# Altium schematic symbol library Ic%.SchLib: 452 symbols (part 3 of 12)
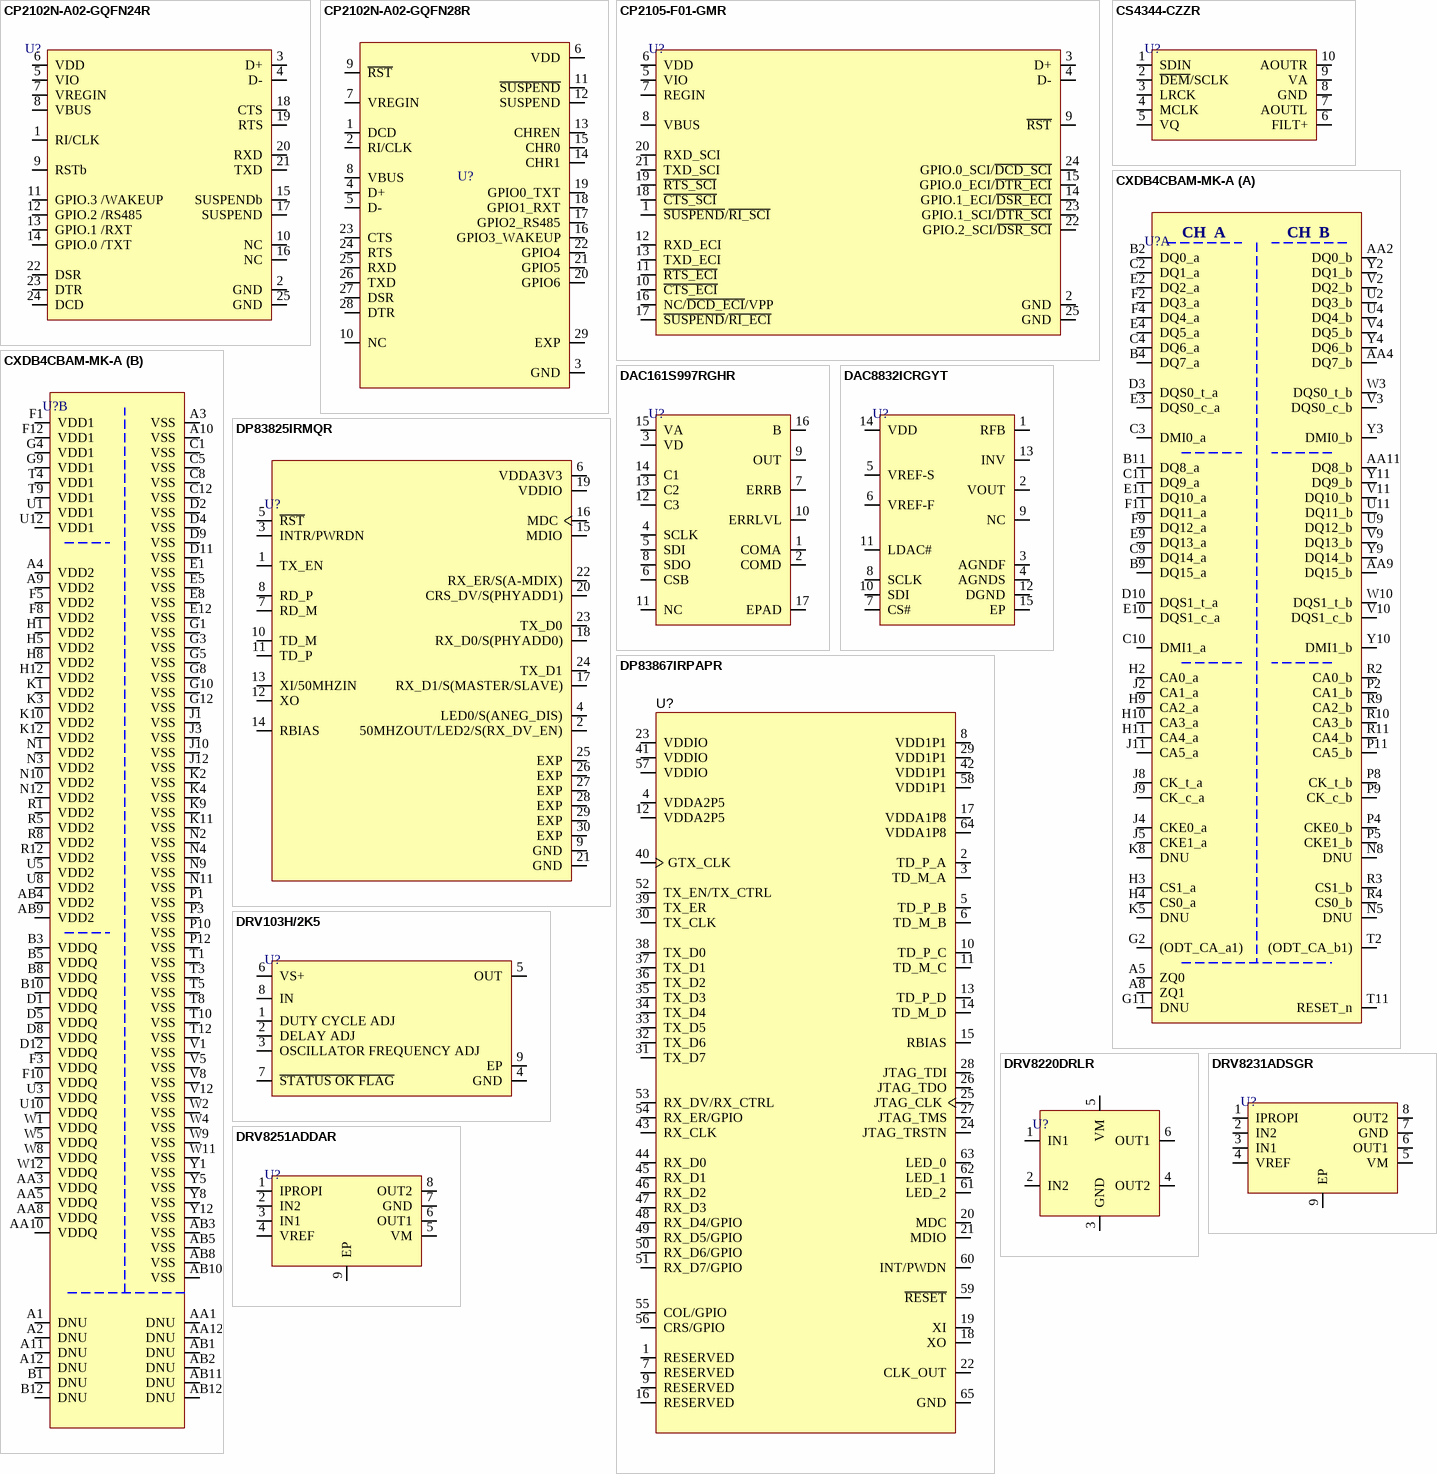
[diagram p25: symbols CP2102N-A02-GQFN24R to DRV8251ADDAR]

## CP2102N-A02-GQFN28R
designator U?
Full Speed USB to UART Bridge USB 2.0 3.3V T/R Automotive 28-Pin QFN EP; Manufacturer: Silicon Labs; Manufacturer Part Number: CP2102N-A02-GQFN28R; Operating Supply Current: 9.5mA; Item Type: IC; Supplier: Arrow Electronics; Supplier Part Number: CP2102N-A02-GQFN28R; RoHS: Yes; Category: USB Interface ICs; Stock: 16500; Pricing: 1500=2.369, 3000=2.265 (USD); Case/Package: QFN; Min Operating Temperature: -40°C; Max Operating Temperature: 85°C; Interface: UART; Series: USBXpress™; Packaging: Cut Tape; ComponentLink1URL: https://www.silabs.com/documents/public/data-sheets/cp2102n-datasheet.pdf?src-supplier=Digikey; ComponentLink1Description: https://www.silabs.com/documents/public/data-sheets/cp2102n-datasheet.pdf?src-supplier=Digikey; ComponentLink2URL: https://4donline.ihs.com/images/VipMasterIC/IC/SILC/SILC-S-A0007770867/SILC-S-A0007770867-1.pdf?hkey=6D3A4C79FDBF58556ACFDE234799DDF0&src-supplier=Farnell; ComponentLink2Description: https://4donline.ihs.com/images/VipMasterIC/IC/SILC/SILC-S-A0007770867/SILC-S-A0007770867-1.pdf?hkey=6D3A4C79FDBF58556ACFDE234799DDF0&src-supplier=Farnell; LCSC Part Number: C964632
footprint 28-QFN (5x5)_
pins: 1 DCD, 2 RI/CLK, 3 GND, 4 D+, 5 D-, 6 VDD, 7 VREGIN, 8 VBUS, 9 ~{RST}, 10 NC, 11 ~{SUSPEND}, 12 SUSPEND, 13 CHREN, 14 CHR1, 15 CHR0, 16 GPIO3_WAKEUP, 17 GPIO2_RS485, 18 GPIO1_RXT, 19 GPIO0_TXT, 20 GPIO6, 21 GPIO5, 22 GPIO4, 23 CTS, 24 RTS, 25 RXD, 26 TXD, 27 DSR, 28 DTR, 29 EXP

## CP2105-F01-GMR
designator U?
IC SGL USB-DL UART BRIDGE 24QFN; Manufacturer: Silicon Labs; Manufacturer Part Number: CP2105-F01-GMR; Number of Channels: 1; Max Supply Voltage: 3.6V; Min Supply Voltage: 3V; Number of I/Os: 5; Operating Supply Current: 17mA; Data Rate: 2Mbps; ESD Protection: Yes; Supplier: Digikey; Supplier Part Number: CP2105-F01-GMRCT-ND; RoHS: Yes; Item Type: IC; Stock: 15350; Pricing: 1=5.17, 10=4.639, 25=4.386, 100=3.8011, 250=3.6062, 500=3.23584 (USD); Mounting Technology: Surface Mount; Case/Package: QFN; Pins: 24; Weight: 0.001764oz; Min Operating Temperature: -40°C; Max Operating Temperature: 85°C; Packaging: Tape and Reel; Package Quantity: 1500; Interface: UART; Number of Transceivers: 1; Series: -; Length: 4mm; Width: 4mm; Height: 0.75mm; ComponentLink1URL: https://datasheet.ciiva.com/12097/cp2105-25736-12097507.pdf?src-supplier=Mouser; ComponentLink1Description: https://datasheet.ciiva.com/12097/cp2105-25736-12097507.pdf?src-supplier=Mouser
footprint 24-WQFN (4x4)
pins: 1 ~{SUSPEND}/~{RI_SCI}, 2 GND, 3 D+, 4 D-, 5 VIO, 6 VDD, 7 REGIN, 8 VBUS, 9 ~{RST}, 10 ~{CTS_ECI}, 11 ~{RTS_ECI}, 12 RXD_ECI, 13 TXD_ECI, 14 GPIO.1_ECI/~{DSR_ECI}, 15 GPIO.0_ECI/~{DTR_ECI}, 16 NC/~{DCD_ECI}/VPP, 17 ~{SUSPEND}/~{RI_ECI}, 18 ~{CTS_SCI}, 19 ~{RTS_SCI}, 20 RXD_SCI, 21 TXD_SCI, 22 GPIO.2_SCI/~{DSR_SCI}, 23 GPIO.1_SCI/~{DTR_SCI}, 24 GPIO.0_SCI/~{DCD_SCI}, 25 GND

## CS4344-CZZR
designator U?
MSOP-10 Digital To Analog Converters (DACs) ROHS; Manufacturer: Cirrus Logic; Manufacturer Part Number: CS4344-CZZR; Item Type: IC; Package: MSOP-10; LCSC Part Number: C8952; ComponentLink1Description: LCSC; ComponentLink1URL: https://www.lcsc.com/product-detail/Digital-To-Analog-Converters-DACs_Cirrus-Logic-CS4344-CZZR_C8952.html
footprint 10-MSOP
pins: 1 SDIN, 2 ~{DE}~{M}/SCLK, 3 LRCK, 4 MCLK, 5 VQ, 6 FILT+, 7 AOUTL, 8 GND, 9 VA, 10 AOUTR

## CXDB4CBAM-MK-A
designator U?
FBGA-200 DDR SDRAM; Manufacturer: CXMT; Manufacturer Part Number: CXDB4CBAM-MK-A; Item Type: IC; Package: FBGA-200; LCSC Part Number: C20598565; ComponentLink1Description: LCSC; ComponentLink1URL: https://www.lcsc.com/product-detail/DDR-SDRAM_CXMT-CXDB4CBAM-MK-A_C20598565.html
footprint 200-WFBGA (10x15)
part A pins: A5 ZQ0, A8 ZQ1, AA2 DQ0_b, AA4 DQ7_b, AA9 DQ15_b, AA11 DQ8_b, B2 DQ0_a, B4 DQ7_a, B9 DQ15_a, B11 DQ8_a, C2 DQ1_a, C3 DMI0_a, C4 DQ6_a, C9 DQ14_a, C10 DMI1_a, C11 DQ9_a, D3 DQS0_t_a, D10 DQS1_t_a, E2 DQ2_a, E3 DQS0_c_a, E4 DQ5_a, E9 DQ13_a, E10 DQS1_c_a, E11 DQ10_a, F2 DQ3_a, F4 DQ4_a, F9 DQ12_a, F11 DQ11_a, G2 (ODT_CA_a1), G11 DNU, H2 CA0_a, H3 CS1_a, H4 CS0_a, H9 CA2_a, H10 CA3_a, H11 CA4_a, J2 CA1_a, J4 CKE0_a, J5 CKE1_a, J8 CK_t_a, J9 CK_c_a, J11 CA5_a, K5 DNU, K8 DNU, N5 DNU, N8 DNU, P2 CA1_b, P4 CKE0_b, P5 CKE1_b, P8 CK_t_b, P9 CK_c_b, P11 CA5_b, R2 CA0_b, R3 CS1_b, R4 CS0_b, R9 CA2_b, R10 CA3_b, R11 CA4_b, T2 (ODT_CA_b1), T11 RESET_n, U2 DQ3_b, U4 DQ4_b, U9 DQ12_b, U11 DQ11_b, V2 DQ2_b, V3 DQS0_c_b, V4 DQ5_b, V9 DQ13_b, V10 DQS1_c_b, V11 DQ10_b, W3 DQS0_t_b, W10 DQS1_t_b, Y2 DQ1_b, Y3 DMI0_b, Y4 DQ6_b, Y9 DQ14_b, Y10 DMI1_b, Y11 DQ9_b
part B pins: A1 DNU, A2 DNU, A3 VSS, A4 VDD2, A9 VDD2, A10 VSS, A11 DNU, A12 DNU, AA1 DNU, AA3 VDDQ, AA5 VDDQ, AA8 VDDQ, AA10 VDDQ, AA12 DNU, AB1 DNU, AB2 DNU, AB3 VSS, AB4 VDD2, AB5 VSS, AB8 VSS, AB9 VDD2, AB10 VSS, AB11 DNU, AB12 DNU, B1 DNU, B3 VDDQ, B5 VDDQ, B8 VDDQ, B10 VDDQ, B12 DNU, C1 VSS, C5 VSS, C8 VSS, C12 VSS, D1 VDDQ, D2 VSS, D4 VSS, D5 VDDQ, D8 VDDQ, D9 VSS, D11 VSS, D12 VDDQ, E1 VSS, E5 VSS, E8 VSS, E12 VSS, F1 VDD1, F3 VDDQ, F5 VDD2, F8 VDD2, F10 VDDQ, F12 VDD1, G1 VSS, G3 VSS, G4 VDD1, G5 VSS, G8 VSS, G9 VDD1, G10 VSS, G12 VSS, H1 VDD2, H5 VDD2, H8 VDD2, H12 VDD2, J1 VSS, J3 VSS, J10 VSS, J12 VSS, K1 VDD2, K2 VSS, K3 VDD2, K4 VSS, K9 VSS, K10 VDD2, K11 VSS, K12 VDD2, N1 VDD2, N2 VSS, N3 VDD2, N4 VSS, N9 VSS, N10 VDD2, N11 VSS, N12 VDD2, P1 VSS, P3 VSS, P10 VSS, P12 VSS, R1 VDD2, R5 VDD2, R8 VDD2, R12 VDD2, T1 VSS, T3 VSS, T4 VDD1, T5 VSS, T8 VSS, T9 VDD1, T10 VSS, T12 VSS, U1 VDD1, U3 VDDQ, U5 VDD2, U8 VDD2, U10 VDDQ, U12 VDD1, V1 VSS, V5 VSS, V8 VSS, V12 VSS, W1 VDDQ, W2 VSS, W4 VSS, W5 VDDQ, W8 VDDQ, W9 VSS, W11 VSS, W12 VDDQ, Y1 VSS, Y5 VSS, Y8 VSS, Y12 VSS
part A text: CH  A; CH  B

## DAC161S997RGHR
designator U?
IC DAC 16BIT 16WQFN; Manufacturer: Texas Instruments; Manufacturer Part Number: DAC161S997RGHR; Supplier: Mouser; LCSC Part Number: C90500; RoHS: Yes; Item Type: IC; Stock: 4693; Pricing: 1=5.54, 10=4.08, 50=4.08, 100=3.71, 1000=3.03, 10000=2.74 (USD); ComponentLink1URL: https://datasheet.ciiva.com/18633/dac161s997-18633093.pdf?src-supplier=Digikey; ComponentLink1Description: https://datasheet.ciiva.com/18633/dac161s997-18633093.pdf?src-supplier=Digikey; ComponentLink2URL: https://datasheet.ciiva.com/29897/dac161s997-29897307.pdf?src-supplier=Avnet; ComponentLink2Description: https://datasheet.ciiva.com/29897/dac161s997-29897307.pdf?src-supplier=Avnet
footprint 16-WQFN (4x4)
pins: 1 COMA, 2 COMD, 3 VD, 4 SCLK, 5 SDI, 6 CSB, 7 ERRB, 8 SDO, 9 OUT, 10 ERRLVL, 11 NC, 12 C3, 13 C2, 14 C1, 15 VA, 16 B, 17 EPAD

## DAC8832ICRGYT
designator U?
IC DAC 16BIT V-OUT 14VQFN; Manufacturer: Texas Instruments; Manufacturer Part Number: DAC8832ICRGYT; Supplier: Mouser; LCSC Part Number: C2876764; RoHS: Yes; Item Type: IC; Stock: 307; Pricing: 1=16.19, 10=12.83, 50=11.99, 100=11.06, 1000=10.23, 10000=10.23 (USD); ComponentLink1URL: https://datasheet.ciiva.com/12285/sbas380b-190797-12285552.pdf?src-supplier=Mouser; ComponentLink1Description: https://datasheet.ciiva.com/12285/sbas380b-190797-12285552.pdf?src-supplier=Mouser; ComponentLink2URL: https://datasheet.ciiva.com/15147/getdatasheetpartid-247745-15147072.pdf?src-supplier=Verical; ComponentLink2Description: https://datasheet.ciiva.com/15147/getdatasheetpartid-247745-15147072.pdf?src-supplier=Verical; ComponentLink3URL: https://datasheet.ciiva.com/41460/001186155-da-01-en-ic-dac-16bit-vo-dac8832icrgyt-qfn-14-tid-41460090.pdf?src-supplier=Conrad; ComponentLink3Description: https://datasheet.ciiva.com/41460/001186155-da-01-en-ic-dac-16bit-vo-dac8832icrgyt-qfn-14-tid-41460090.pdf?src-supplier=Conrad; ComponentLink4URL: https://datasheet.ciiva.com/14254/sbas380b-14254541.pdf?src-supplier=Avnet; ComponentLink4Description: https://datasheet.ciiva.com/14254/sbas380b-14254541.pdf?src-supplier=Avnet; ComponentLink5URL: https://datasheet.ciiva.com/1364/dac8832-1364376.pdf?src-supplier=Digikey; ComponentLink5Description: https://datasheet.ciiva.com/1364/dac8832-1364376.pdf?src-supplier=Digikey; ComponentLink6URL: https://datasheet.ciiva.com/1364/dac8832-1364377.pdf?src-supplier=Digikey; ComponentLink6Description: https://datasheet.ciiva.com/1364/dac8832-1364377.pdf?src-supplier=Digikey; ComponentLink7URL: https://datasheet.ciiva.com/1364/dac8832-1364378.pdf?src-supplier=Digikey; ComponentLink7Description: https://datasheet.ciiva.com/1364/dac8832-1364378.pdf?src-supplier=Digikey
footprint 14-VQFN (3.5x3.5)
pins: 1 RFB, 2 VOUT, 3 AGNDF, 4 AGNDS, 5 VREF-S, 6 VREF-F, 7 CS#, 8 SCLK, 9 NC, 10 SDI, 11 LDAC#, 12 DGND, 13 INV, 14 VDD, 15 EP

## DP83825IRMQR
designator U?
IC TXRX FULL/HALF 1/1 24WQFN; Manufacturer: Texas Instruments; Manufacturer Part Number: DP83825IRMQR; Supplier: Mouser; Supplier Part Number: 595-DP83825IRMQR; RoHS: Yes; Category: Ethernet Interface ICs; Stock: 48053; Pricing: 1=1.33, 10=1.14, 50=1.14, 100=0.868, 1000=0.606, 10000=0.528 (USD); ComponentLink1URL: http://www.ti.com/general/docs/suppproductinfo.tsp?distId=10&amp;gotoUrl=http%3A%2F%2Fwww.ti.com%2Flit%2Fgpn%2Fdp83825I&src-supplier=Digikey; ComponentLink1Description: http://www.ti.com/general/docs/suppproductinfo.tsp?distId=10&amp;gotoUrl=http%3A%2F%2Fwww.ti.com%2Flit%2Fgpn%2Fdp83825I&src-supplier=Digikey; Item Type: IC
footprint 24-WQFN (3x3)
pins: 1 TX_EN, 2 50MHZOUT/LED2/S(RX_DV_EN), 3 INTR/PWRDN, 4 LED0/S(ANEG_DIS), 5 ~{RST}, 6 VDDA3V3, 7 RD_M, 8 RD_P, 9 GND, 10 TD_M, 11 TD_P, 12 XO, 13 XI/50MHZIN, 14 RBIAS, 15 MDIO, 16 MDC, 17 RX_D1/S(MASTER/SLAVE), 18 RX_D0/S(PHYADD0), 19 VDDIO, 20 CRS_DV/S(PHYADD1), 21 GND, 22 RX_ER/S(A-MDIX), 23 TX_D0, 24 TX_D1, 25 EXP, 26 EXP, 27 EXP, 28 EXP, 29 EXP, 30 EXP

## DP83867IRPAPR
designator U?
IC ETHERNET PHY 64HTQFP; Manufacturer: Texas Instruments; Manufacturer Part Number: DP83867IRPAPR; Supplier: Mouser; LCSC Part Number: C477933; RoHS: Yes; Item Type: IC; Stock: 1967; Pricing: 1=8.83, 10=6.69, 50=6.07, 100=5.32, 1000=4.58, 10000=4.58 (USD); ComponentLink1URL: http://www.ti.com/general/docs/suppproductinfo.tsp?distId=10&amp;gotoUrl=http%3A%2F%2Fwww.ti.com%2Flit%2Fgpn%2Fdp83867ir&src-supplier=Digikey; ComponentLink1Description: http://www.ti.com/general/docs/suppproductinfo.tsp?distId=10&amp;gotoUrl=http%3A%2F%2Fwww.ti.com%2Flit%2Fgpn%2Fdp83867ir&src-supplier=Digikey
footprint 64-HTQFP (10x10)
pins: 1 RESERVED, 2 TD_P_A, 3 TD_M_A, 4 VDDA2P5, 5 TD_P_B, 6 TD_M_B, 7 RESERVED, 8 VDD1P1, 9 RESERVED, 10 TD_P_C, 11 TD_M_C, 12 VDDA2P5, 13 TD_P_D, 14 TD_M_D, 15 RBIAS, 16 RESERVED, 17 VDDA1P8, 18 XO, 19 XI, 20 MDC, 21 MDIO, 22 CLK_OUT, 23 VDDIO, 24 JTAG_TRSTN, 25 JTAG_CLK, 26 JTAG_TDO, 27 JTAG_TMS, 28 JTAG_TDI, 29 VDD1P1, 30 TX_CLK, 31 TX_D7, 32 TX_D6, 33 TX_D5, 34 TX_D4, 35 TX_D3, 36 TX_D2, 37 TX_D1, 38 TX_D0, 39 TX_ER, 40 GTX_CLK, 41 VDDIO, 42 VDD1P1, 43 RX_CLK, 44 RX_D0, 45 RX_D1, 46 RX_D2, 47 RX_D3, 48 RX_D4/GPIO, 49 RX_D5/GPIO, 50 RX_D6/GPIO, 51 RX_D7/GPIO, 52 TX_EN/TX_CTRL, 53 RX_DV/RX_CTRL, 54 RX_ER/GPIO, 55 COL/GPIO, 56 CRS/GPIO, 57 VDDIO, 58 VDD1P1, 59 ~{RESET}, 60 INT/PWDN, 61 LED_2, 62 LED_1, 63 LED_0, 64 VDDA1P8, 65 GND

## DRV103H/2K5
designator U?
IC PWR DRVR N-CHAN 1:1 8SOPWRPAD; Manufacturer: Texas Instruments; Manufacturer Part Number: DRV103H/2K5; Number of Channels: 1NUMBER; Supplier: Mouser; LCSC Part Number: C544418; RoHS: Yes; Item Type: IC; Stock: 2092; Pricing: 1=4.53, 10=3.85, 50=3.85, 100=3.33, 1000=2.39, 10000=2.24 (USD); Length: 4.89mm; Width: 3.9mm; Height: 1.7mm; Thickness: 1.48mm; Lead Free: 5697LeadFree; RoHS Compliant: 5897YesNo; ComponentLink1URL: https://datasheet.ciiva.com/15110/getdatasheetpartid-547625-15110691.pdf?src-supplier=Verical; ComponentLink1Description: https://datasheet.ciiva.com/15110/getdatasheetpartid-547625-15110691.pdf?src-supplier=Verical; ComponentLink2URL: https://datasheet.ciiva.com/1958/drv103-1958756.pdf?src-supplier=Digikey; ComponentLink2Description: https://datasheet.ciiva.com/1958/drv103-1958756.pdf?src-supplier=Digikey; ComponentLink3URL: https://datasheet.ciiva.com/1958/drv103-1958757.pdf?src-supplier=Digikey; ComponentLink3Description: https://datasheet.ciiva.com/1958/drv103-1958757.pdf?src-supplier=Digikey; ComponentLink4URL: https://datasheet.ciiva.com/1958/drv103-1958758.pdf?src-supplier=Digikey; ComponentLink4Description: https://datasheet.ciiva.com/1958/drv103-1958758.pdf?src-supplier=Digikey
footprint 8-SO PowerPad
pins: 1 DUTY CYCLE ADJ "Internally, this pin connects to the input of a comparator and a (2.75 x IREF) current source from VS. The voltage at this node linearly sets the duty cycle. Duty cycle can be programmed with a resistor, analog voltage, or (See Datasheet)", 2 DELAY ADJ "This pin sets the duration of the initial 100% duty cycle before the output goes into PWM mode. Leaving this pin floating results in a delay of approximately 18us, which is internally limited by parasitic capacitance. (See Datasheet)", 3 OSCILLATOR FREQUENCY ADJ "PWM frequency is adjustable. A resistor to ground sets the current IREF and the internal PWM oscillator frequency. A range of 500Hz Frequency Adjust to 100kHz can be achieved with practical resistor values. Although (See Datasheet)", 4 GND "This pin must be connected to system ground for the DRV103 to function. It carries the 0.4mA quiescent current plus the full load current when the power DMOS transistor is switched on.", 5 OUT "The output is the drain of a power DMOS transistor with its source connected to ground. Its low on-resistance (0.5ohm typ) assures low power dissipation in the DRV103. Gate drive to the power device is controlled to provide (See Datasheet)", 6 VS+ "This is the power supply pin. Operating range is +8V to +32V. +VS must be >= the supply voltage to the load.", 7 ~{STATUS OK FLAG} "Normally HIGH (active LOW), a Flag LOW signals either an over-temperature or over-current fault. The over-current flag (Status OK) is LOW only when the output is ON (constant DC output or the “ON?portion of PWM mode)(See Datasheet)", 8 IN "The input is compatible with standard TTL levels. The device output becomes enabled when the input voltage is driven above the typical switching threshold, 1.7V. Below this level, the output is disabled. Input current is (See Datasheet)", 9 EP "EXPOSED PAD"

## DRV8220DRLR
designator U?
20-V, 1-A H-BRIDGE MOTOR DRIVER; Manufacturer: Texas Instruments; Manufacturer Part Number: DRV8220DRLR; Item Type: IC; Number of Channels: 1NUMBER; Supplier: Mouser; LCSC Part Number: C3681351; RoHS: No; Stock: 3584; Pricing: 1=0.76, 10=0.627, 50=0.627, 100=0.475, 1000=0.324, 10000=0.262 (USD); Pins: 6NUMBER; Length: 1.6mm; Width: 1.2mm; Height: 600um; Thickness: 550um
footprint SOT-563
pins: 1 IN1, 2 IN2, 3 GND, 4 OUT2, 5 VM, 6 OUT1

## DRV8231ADSGR
designator U?
33V H BRIDGE MOTOR DRIVER WITH C; Manufacturer: Texas Instruments; Manufacturer Part Number: DRV8231ADSGR; Item Type: IC; Number of Channels: 1NUMBER; Supplier: Mouser; Supplier Part Number: 595-DRV8231ADSGR; RoHS: No; Stock: 8609; Pricing: 1=1.52, 10=1.29, 50=1.29, 100=1.1, 1000=0.747, 10000=0.657 (USD); Pins: 8NUMBER; Length: 2mm; Width: 2mm; Height: 800um; Thickness: 750um; LCSC Part Number: C5139865
footprint WSON-8(2x2)
pins: 1 IPROPI, 2 IN2, 3 IN1, 4 VREF, 5 VM, 6 OUT1, 7 GND, 8 OUT2, 9 EP

## DRV8251ADDAR
designator U?
48-V, 3.5-A H BRIDGE MOTOR DRIVE; Manufacturer: Texas Instruments; Manufacturer Part Number: DRV8251ADDAR; Item Type: IC; Supplier: Digikey; LCSC Part Number: C5218844; RoHS: No; Pricing: 1=1.78, 10=1.309, 25=1.1904, 100=1.0602, 250=0.99812, 500=0.96074, 1000=0.92996 (USD); Pins: 8NUMBER; Length: 4.89mm; Width: 3.9mm; Height: 1.7mm; Thickness: 1.48mm
footprint SOPowerPAD(DDA)-8
pins: 1 IPROPI, 2 IN2, 3 IN1, 4 VREF, 5 VM, 6 OUT1, 7 GND, 8 OUT2, 9 EP

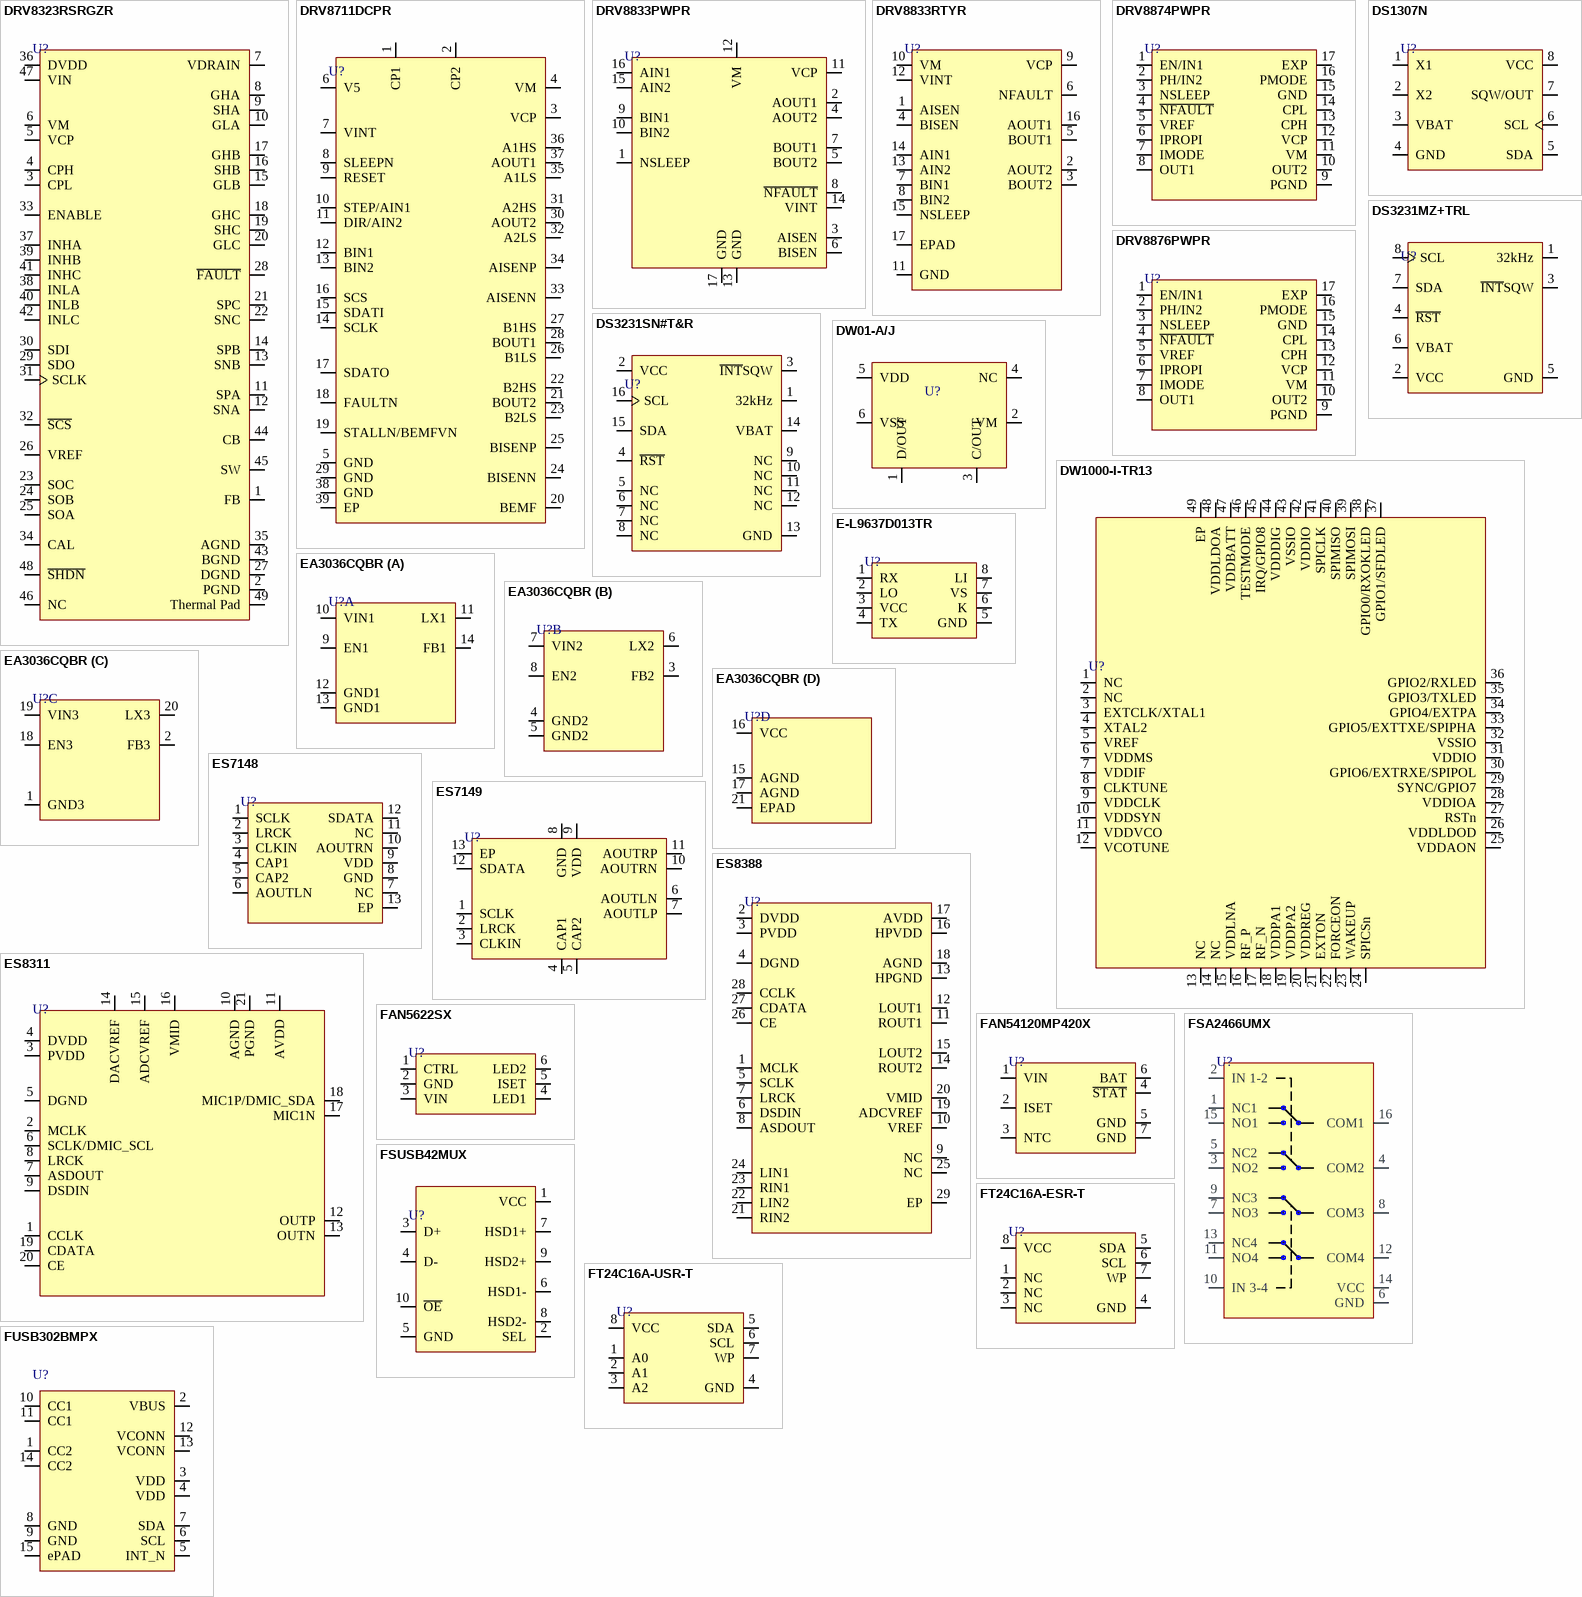
[diagram p4: symbols DRV8323RSRGZR to FUSB302BMPX]

## DRV8323RSRGZR
designator U?
IC MTR DRV MULTIPHAS 6-60V 48QFN; Manufacturer: Texas Instruments; Manufacturer Part Number: DRV8323RSRGZR; Supplier: Digikey; Supplier Part Number: 296-47769-1-ND; RoHS: Yes; Item Type: IC; Stock: 39326; Pricing: 1=5.19, 10=4.659, 25=4.404, 100=3.8169, 250=3.62116, 500=3.24926, 1000=2.74033 (USD); ComponentLink1URL: http://www.ti.com/general/docs/suppproductinfo.tsp?distId=10&amp;gotoUrl=http%3A%2F%2Fwww.ti.com%2Flit%2Fgpn%2Fdrv8323r&src-supplier=Digikey; ComponentLink1Description: http://www.ti.com/general/docs/suppproductinfo.tsp?distId=10&amp;gotoUrl=http%3A%2F%2Fwww.ti.com%2Flit%2Fgpn%2Fdrv8323r&src-supplier=Digikey; ComponentLink2URL: http://www.ti.com/lit/ds/symlink/drv8323r.pdf?src-supplier=Digikey; ComponentLink2Description: http://www.ti.com/lit/ds/symlink/drv8323r.pdf?src-supplier=Digikey
footprint 48-VQFN (7x7)
pins: 1 FB, 2 PGND, 3 CPL, 4 CPH, 5 VCP, 6 VM, 7 VDRAIN, 8 GHA, 9 SHA, 10 GLA, 11 SPA, 12 SNA, 13 SNB, 14 SPB, 15 GLB, 16 SHB, 17 GHB, 18 GHC, 19 SHC, 20 GLC, 21 SPC, 22 SNC, 23 SOC, 24 SOB, 25 SOA, 26 VREF, 27 DGND, 28 ~{FAULT}, 29 SDO, 30 SDI, 31 SCLK, 32 ~{SCS}, 33 ENABLE, 34 CAL, 35 AGND, 36 DVDD, 37 INHA, 38 INLA, 39 INHB, 40 INLB, 41 INHC, 42 INLC, 43 BGND, 44 CB, 45 SW, 46 NC, 47 VIN, 48 ~{SHDN}, 49 Thermal Pad

## DRV8711DCPR
designator U?
IC MTR DRV BIPOLR 8-52V 38HTSSOP; Manufacturer: Texas Instruments; Manufacturer Part Number: DRV8711DCPR; Output Current: 200mA; Output Voltage: 5V; Min Supply Voltage: 8V; Max Supply Voltage: 52V; Interface: SPI; Supply Current: 17mA; Supplier: Mouser; LCSC Part Number: C60013; RoHS: Yes; Item Type: IC; Stock: 9050; Pricing: 1=4.97, 10=4.29, 50=4.29, 100=3.66, 1000=2.63, 10000=2.48 (USD); Mounting Technology: Surface Mount; Case/Package: HTSSOP; Pins: 38; Min Operating Temperature: -40°C; Max Operating Temperature: 85°C; Packaging: Tape and Reel; Package Quantity: 2000; Series: -; Radiation Hardening: No; Lead Free: Lead Free; RoHS Compliant: Yes; ComponentLink1URL: https://datasheet.ciiva.com/24016/slvsc40d-317294-24016712.pdf?src-supplier=Mouser; ComponentLink1Description: https://datasheet.ciiva.com/24016/slvsc40d-317294-24016712.pdf?src-supplier=Mouser
footprint HTSSOP-38-EP-4.4mm
pins: 1 CP1, 2 CP2, 3 VCP, 4 VM, 5 GND, 6 V5, 7 VINT, 8 SLEEPN, 9 RESET, 10 STEP/AIN1, 11 DIR/AIN2, 12 BIN1, 13 BIN2, 14 SCLK, 15 SDATI, 16 SCS, 17 SDATO, 18 FAULTN, 19 STALLN/BEMFVN, 20 BEMF, 21 BOUT2, 22 B2HS, 23 B2LS, 24 BISENN, 25 BISENP, 26 B1LS, 27 B1HS, 28 BOUT1, 29 GND, 30 AOUT2, 31 A2HS, 32 A2LS, 33 AISENN, 34 AISENP, 35 A1LS, 36 A1HS, 37 AOUT1, 38 GND, 39 EP

## DRV8833PWPR
designator U?
IC MOTOR DRIVER PAR 16HTSSOP; Manufacturer: Texas Instruments; Manufacturer Part Number: DRV8833PWPR; Supplier: Digi-Key; Supplier Part Number: 296-29434-1-ND; RoHS: Yes; Category: Motor Drivers; Stock: 4877; Pricing: 1=2.5, 10=2.246, 25=2.1184, 100=1.8049, 250=1.6948, 500=1.48294, 1000=1.22872 (USD); ComponentLink1URL: https://datasheet.ciiva.com/22697/1769096-22697185.pdf?src-supplier=Element14; ComponentLink1Description: https://datasheet.ciiva.com/22697/1769096-22697185.pdf?src-supplier=Element14; ComponentLink2URL: https://datasheet.ciiva.com/3229/drv8833-3229712.pdf?src-supplier=Avnet; ComponentLink2Description: https://datasheet.ciiva.com/3229/drv8833-3229712.pdf?src-supplier=Avnet; ComponentLink3URL: https://datasheet.ciiva.com/15109/getdatasheetpartid-344250-15109480.pdf?src-supplier=Verical; ComponentLink3Description: https://datasheet.ciiva.com/15109/getdatasheetpartid-344250-15109480.pdf?src-supplier=Verical; ComponentLink4URL: https://datasheet.ciiva.com/1500/1857491-1500620.pdf?src-supplier=Element14; ComponentLink4Description: https://datasheet.ciiva.com/1500/1857491-1500620.pdf?src-supplier=Element14; ComponentLink5URL: https://datasheet.ciiva.com/1958/drv8833-1958713.pdf?src-supplier=Digi-Key; ComponentLink5Description: https://datasheet.ciiva.com/1958/drv8833-1958713.pdf?src-supplier=Digi-Key; ComponentLink6URL: https://datasheet.ciiva.com/1958/drv8833-1958714.pdf?src-supplier=Digi-Key; ComponentLink6Description: https://datasheet.ciiva.com/1958/drv8833-1958714.pdf?src-supplier=Digi-Key; ComponentLink7URL: https://datasheet.ciiva.com/1958/drv8833-1958715.pdf?src-supplier=Digi-Key; ComponentLink7Description: https://datasheet.ciiva.com/1958/drv8833-1958715.pdf?src-supplier=Digi-Key; LCSC Part Number: C50506; Item Type: IC
footprint HTSSOP-16
pins: 1 NSLEEP, 2 AOUT1, 3 AISEN, 4 AOUT2, 5 BOUT2, 6 BISEN, 7 BOUT1, 8 ~{NFAULT}, 9 BIN1, 10 BIN2, 11 VCP, 12 VM, 13 GND, 14 VINT, 15 AIN2, 16 AIN1, 17 GND

## DRV8833RTYR
designator U?
IC MOTOR DRIVER PAR 16QFN; Manufacturer: Texas Instruments; Manufacturer Part Number: DRV8833RTYR; Supplier: Mouser; Supplier Part Number: 595-DRV8833RTYR; RoHS: Yes; Item Type: IC; Stock: 2803; Pricing: 1=1.6, 10=1.36, 50=1.36, 100=1.16, 1000=0.954, 10000=0.875 (USD); ComponentLink1URL: https://datasheet.ciiva.com/15109/getdatasheetpartid-567030-15109665.pdf?src-supplier=Verical; ComponentLink1Description: https://datasheet.ciiva.com/15109/getdatasheetpartid-567030-15109665.pdf?src-supplier=Verical; ComponentLink2URL: https://datasheet.ciiva.com/3229/drv8833-3229034.pdf?src-supplier=Avnet; ComponentLink2Description: https://datasheet.ciiva.com/3229/drv8833-3229034.pdf?src-supplier=Avnet; ComponentLink3URL: https://datasheet.ciiva.com/1959/drv8833-1959716.pdf?src-supplier=Digikey; ComponentLink3Description: https://datasheet.ciiva.com/1959/drv8833-1959716.pdf?src-supplier=Digikey; ComponentLink4URL: https://datasheet.ciiva.com/1959/drv8833-1959717.pdf?src-supplier=Digikey; ComponentLink4Description: https://datasheet.ciiva.com/1959/drv8833-1959717.pdf?src-supplier=Digikey; ComponentLink5URL: https://datasheet.ciiva.com/1959/drv8833-1959718.pdf?src-supplier=Digikey; ComponentLink5Description: https://datasheet.ciiva.com/1959/drv8833-1959718.pdf?src-supplier=Digikey; LCSC Part Number: C154936
footprint QFN-16-EP(4x4)
pins: 1 AISEN, 2 AOUT2, 3 BOUT2, 4 BISEN, 5 BOUT1, 6 NFAULT, 7 BIN1, 8 BIN2, 9 VCP, 10 VM, 11 GND, 12 VINT, 13 AIN2, 14 AIN1, 15 NSLEEP, 16 AOUT1, 17 EPAD

## DRV8874PWPR
designator U?
DRV8874 H-BRIDGE MOTOR DRIVER; Manufacturer: Texas Instruments; Manufacturer Part Number: DRV8874PWPR; Item Type: IC; Supplier: Mouser; Supplier Part Number: 595-DRV8874PWPR; RoHS: Yes; Stock: 13429; Pricing: 1=2.68, 10=2.4, 50=2.4, 100=1.93, 1000=1.31, 10000=1.22 (USD); Length: 5mm; Width: 4.4mm; Height: 1.2mm; Thickness: 1mm; ComponentLink1URL: http://www.ti.com/general/docs/suppproductinfo.tsp?distId=10&amp;gotoUrl=http%3A%2F%2Fwww.ti.com%2Flit%2Fgpn%2Fdrv8874&src-supplier=Digikey; ComponentLink1Description: http://www.ti.com/general/docs/suppproductinfo.tsp?distId=10&amp;gotoUrl=http%3A%2F%2Fwww.ti.com%2Flit%2Fgpn%2Fdrv8874&src-supplier=Digikey; LCSC Part Number: C1855818
footprint HTSSOP-16
pins: 1 EN/IN1, 2 PH/IN2, 3 NSLEEP, 4 ~{NFAULT}, 5 VREF, 6 IPROPI, 7 IMODE, 8 OUT1, 9 PGND, 10 OUT2, 11 VM, 12 VCP, 13 CPH, 14 CPL, 15 GND, 16 PMODE, 17 EXP

## DRV8876PWPR
designator U?
IC MOTOR DRIVER DC 5.5V 16HTSSOP; Manufacturer: Texas Instruments; Manufacturer Part Number: DRV8876PWPR; Supplier: Mouser; Supplier Part Number: 595-DRV8876PWPR; RoHS: Yes; Category: Motor Drivers; Stock: 10991; Pricing: 1=1.83, 10=1.57, 50=1.57, 100=1.32, 1000=0.903, 10000=0.768 (USD); ComponentLink1URL: http://www.ti.com/general/docs/suppproductinfo.tsp?distId=10&amp;gotoUrl=http%3A%2F%2Fwww.ti.com%2Flit%2Fgpn%2Fdrv8876&src-supplier=Digikey; ComponentLink1Description: http://www.ti.com/general/docs/suppproductinfo.tsp?distId=10&amp;gotoUrl=http%3A%2F%2Fwww.ti.com%2Flit%2Fgpn%2Fdrv8876&src-supplier=Digikey; LCSC Part Number: C575551; Item Type: IC
footprint HTSSOP-16
pins: 1 EN/IN1, 2 PH/IN2, 3 NSLEEP, 4 ~{NFAULT}, 5 VREF, 6 IPROPI, 7 IMODE, 8 OUT1, 9 PGND, 10 OUT2, 11 VM, 12 VCP, 13 CPH, 14 CPL, 15 GND, 16 PMODE, 17 EXP

## DS1307N
designator U?
DIP-8 Real Time Clocks ROHS; Manufacturer: Maxim; Manufacturer Part Number: DS1307N; Item Type: IC; Supplier: Mouser; LCSC Part Number: C434596; RoHS: Yes; Stock: 754; Pricing: 1=6.11, 10=4.06, 50=4.06, 100=3.42, 1000=2.77, 10000=2.6 (USD); ComponentLink1URL: https://datasheet.ciiva.com/19457/1194695-19457341.pdf?src-supplier=Jameco; ComponentLink1Description: https://datasheet.ciiva.com/19457/1194695-19457341.pdf?src-supplier=Jameco; ComponentLink2URL: https://datasheet.ciiva.com/30480/0900766b81253c0a-30480875.pdf?src-supplier=Rs; ComponentLink2Description: https://datasheet.ciiva.com/30480/0900766b81253c0a-30480875.pdf?src-supplier=Rs; ComponentLink3URL: https://datasheet.ciiva.com/1240/ds1307-1240473.pdf?src-supplier=Digikey; ComponentLink3Description: https://datasheet.ciiva.com/1240/ds1307-1240473.pdf?src-supplier=Digikey; ComponentLink4URL: https://datasheet.ciiva.com/3304/ds1307-3304456.pdf?src-supplier=Avnet; ComponentLink4Description: https://datasheet.ciiva.com/3304/ds1307-3304456.pdf?src-supplier=Avnet
footprint 8-PDIP
pins: 1 X1, 2 X2, 3 VBAT, 4 GND, 5 SDA, 6 SCL, 7 SQW/OUT, 8 VCC

## DS3231MZ+TRL
designator U?
IC RTC CLK/CALENDAR I2C 8SOIC; Manufacturer: Maxim; Manufacturer Part Number: DS3231MZ+TRL; Interface: I2C,Serial,2-Wire; Logic Function: Clock; Min Supply Voltage: 2.3V; Max Supply Voltage: 5.5V; Time Format: HH:MM:SS (12/24 hr); Date Format: YY-MM-DD-dd; Operating Supply Voltage: 3.3V; Supplier: Mouser; LCSC Part Number: C107410; RoHS: Yes; Item Type: IC; Stock: 7947; Pricing: 1=12.6, 10=8.92, 50=7.97, 100=6.91, 1000=5.9, 10000=5.9 (USD); Mounting Technology: Surface Mount; Case/Package: SOIC; Pins: 8; Min Operating Temperature: -40°C; Max Operating Temperature: 85°C; Packaging: Tape and Reel; Package Quantity: 1000; Series: DS3231MZ; Radiation Hardening: No; Reach SVHC Compliant: Unknown; RoHS Compliant: Yes; ComponentLink1URL: https://datasheet.ciiva.com/1243/ds3231m-1243728.pdf?src-supplier=Digikey; ComponentLink1Description: https://datasheet.ciiva.com/1243/ds3231m-1243728.pdf?src-supplier=Digikey; ComponentLink2URL: https://datasheet.ciiva.com/14244/ds3231m-14244349.pdf?src-supplier=Avnet; ComponentLink2Description: https://datasheet.ciiva.com/14244/ds3231m-14244349.pdf?src-supplier=Avnet; ComponentLink3URL: https://datasheet.ciiva.com/12291/ds3231m-35560-12291992.pdf?src-supplier=Mouser; ComponentLink3Description: https://datasheet.ciiva.com/12291/ds3231m-35560-12291992.pdf?src-supplier=Mouser
footprint SOIC-8(0.154", 3.90mm Width)
pins: 1 32kHz, 2 VCC, 3 ~{INT}SQW, 4 ~{RST}, 5 GND, 6 VBAT, 7 SDA, 8 SCL

## DS3231SN#T&R
designator U?
IC RTC CLK/CALENDAR I2C 16SOIC; Manufacturer: Maxim; Manufacturer Part Number: DS3231SN#T&R; Max Supply Voltage: 5.5V; Min Supply Voltage: 2.3V; Logic Function: Clock; Time Format: HH:MM:SS; Operating Supply Voltage: 3.3V; Interface: I2C,Serial,2-Wire; Date Format: YY-MM-DD-dd; Supplier: Mouser; LCSC Part Number: C9866; RoHS: Yes; Item Type: IC; Stock: 1585; Pricing: 1=14.87, 10=10.62, 50=9.53, 100=8.31, 1000=7.25, 10000=7.25 (USD); Mounting Technology: Surface Mount; Case/Package: SOIC; Pins: 16; Min Operating Temperature: -40°C; Max Operating Temperature: 85°C; Packaging: Tape and Reel; Package Quantity: 1000; Series: -; Radiation Hardening: No; Lead Free: Lead Free; RoHS Compliant: Yes
footprint 16-SOIC (0.295", 7.50mm Width)
pins: 1 32kHz, 2 VCC, 3 ~{INT}SQW, 4 ~{RST}, 5 NC, 6 NC, 7 NC, 8 NC, 9 NC, 10 NC, 11 NC, 12 NC, 13 GND, 14 VBAT, 15 SDA, 16 SCL

## DW01-A/J
designator U?
SOT-23-6 Battery Management ROHS; Manufacturer: Shenzhen Fuman Elec; Manufacturer Part Number: DW01-A/J; Item Type: IC; Package: SOT-23-6; LCSC Part Number: C18186335; ComponentLink1Description: LCSC; ComponentLink1URL: https://www.lcsc.com/product-detail/Battery-Management_Shenzhen-Fuman-Elec-DW01-A-J_C18186335.html
footprint SOT-23-6
pins: 1 D/OUT, 2 VM, 3 C/OUT, 4 NC, 5 VDD, 6 VSS

## DW1000-I-TR13
designator U?
IC RF TXRX 802.15.4 48QFN; Manufacturer: Qorvo; Manufacturer Part Number: DW1000-I-TR13; Supplier: Mouser; LCSC Part Number: C5241969; RoHS: No; Item Type: IC; Stock: 7464; Pricing: 1=9.63, 10=9.63, 50=8.58, 100=7.88, 1000=6.13, 10000=4.55 (USD); ComponentLink1URL: https://datasheet.octopart.com/DW1000-I-TR13-Qorvo-datasheet-147457540.pdf?src-supplier=RFMW; ComponentLink1Description: https://datasheet.octopart.com/DW1000-I-TR13-Qorvo-datasheet-147457540.pdf?src-supplier=RFMW
footprint QFN-48-EP(6x6)
pins: 1 NC, 2 NC, 3 EXTCLK/XTAL1, 4 XTAL2, 5 VREF, 6 VDDMS, 7 VDDIF, 8 CLKTUNE, 9 VDDCLK, 10 VDDSYN, 11 VDDVCO, 12 VCOTUNE, 13 NC, 14 NC, 15 VDDLNA, 16 RF_P, 17 RF_N, 18 VDDPA1, 19 VDDPA2, 20 VDDREG, 21 EXTON, 22 FORCEON, 23 WAKEUP, 24 SPICSn, 25 VDDAON, 26 VDDLDOD, 27 RSTn, 28 VDDIOA, 29 SYNC/GPIO7, 30 GPIO6/EXTRXE/SPIPOL, 31 VDDIO, 32 VSSIO, 33 GPIO5/EXTTXE/SPIPHA, 34 GPIO4/EXTPA, 35 GPIO3/TXLED, 36 GPIO2/RXLED, 37 GPIO1/SFDLED, 38 GPIO0/RXOKLED, 39 SPIMOSI, 40 SPIMISO, 41 SPICLK, 42 VDDIO, 43 VSSIO, 44 VDDDIG, 45 IRQ/GPIO8, 46 TESTMODE, 47 VDDBATT, 48 VDDLDOA, 49 EP

## E-L9637D013TR
designator U?
IC TRANSCEIVER 1/1 8SOIC; Manufacturer: STMicroelectronics; Manufacturer Part Number: E-L9637D013TR; Supplier: Arrow Electronics; LCSC Part Number: C153038; RoHS: Yes; Item Type: IC; Stock: 37500; Pricing: 2500=0.8807, 10000=0.8618 (USD); ComponentLink1URL: https://datasheet.ciiva.com/15134/getdatasheetpartid-321649-15134761.pdf?src-supplier=Verical; ComponentLink1Description: https://datasheet.ciiva.com/15134/getdatasheetpartid-321649-15134761.pdf?src-supplier=Verical; ComponentLink2URL: https://datasheet.ciiva.com/1781/cd00000234-1781634.pdf?src-supplier=Digikey; ComponentLink2Description: https://datasheet.ciiva.com/1781/cd00000234-1781634.pdf?src-supplier=Digikey; ComponentLink3URL: https://datasheet.ciiva.com/1781/cd00000234-1781635.pdf?src-supplier=Digikey; ComponentLink3Description: https://datasheet.ciiva.com/1781/cd00000234-1781635.pdf?src-supplier=Digikey; ComponentLink4URL: https://datasheet.ciiva.com/1781/cd00000234-1781636.pdf?src-supplier=Digikey; ComponentLink4Description: https://datasheet.ciiva.com/1781/cd00000234-1781636.pdf?src-supplier=Digikey; ComponentLink5URL: https://datasheet.ciiva.com/4783/cd00000234-4783337.pdf?src-supplier=Mouser; ComponentLink5Description: https://datasheet.ciiva.com/4783/cd00000234-4783337.pdf?src-supplier=Mouser
footprint SOIC-8(0.154", 3.90mm Width)
pins: 1 RX, 2 LO, 3 VCC, 4 TX, 5 GND, 6 K, 7 VS, 8 LI

## EA3036CQBR
designator U?
2.7V~5.5V 3 WQFN-20-EP(3x3) Battery Management ICs ROHS; Manufacturer: Everanalog IC Design; Manufacturer Part Number: EA3036CQBR; Item Type: IC; Package: WQFN-20-EP(3x3); LCSC Part Number: C570857; ComponentLink1Description: LCSC; ComponentLink1URL: https://www.lcsc.com/product-detail/Battery-Management-ICs_Everanalog-IC-design-EA3036CQBR_C570857.html
footprint 20-QFN(3x3)
part A pins: 9 EN1, 10 VIN1, 11 LX1, 12 GND1, 13 GND1, 14 FB1
part B pins: 3 FB2, 4 GND2, 5 GND2, 6 LX2, 7 VIN2, 8 EN2
part C pins: 1 GND3, 2 FB3, 18 EN3, 19 VIN3, 20 LX3
part D pins: 15 AGND, 16 VCC, 17 AGND, 21 EPAD

## ES7148
designator U?
QFN-12-EP(2.5x2.5) ADCs/DACs - Special Purpose ROHS; Manufacturer: Everest-semi(Everest Semiconductor); Manufacturer Part Number: ES7148; Item Type: IC; Package: QFN-12-EP(2.5x2.5); LCSC Part Number: C365752; ComponentLink1Description: LCSC; ComponentLink1URL: https://www.lcsc.com/product-detail/ADCs-DACs-Special-Purpose_Everest-semi-Everest-Semiconductor-ES7148_C365752.html?s_z=n_es7148
footprint QFN-12-EP(2.5x2.5)
pins: 1 SCLK, 2 LRCK, 3 CLKIN, 4 CAP1, 5 CAP2, 6 AOUTLN, 7 NC, 8 GND, 9 VDD, 10 AOUTRN, 11 NC, 12 SDATA, 13 EP

## ES7149
designator U?
QFN-12-EP(2.5x2.5) ADCs/DACs - Special Purpose ROHS; Manufacturer: Everest-semi(Everest Semiconductor); Manufacturer Part Number: ES7149; Item Type: IC; Package: QFN-12-EP(2.5x2.5); LCSC Part Number: C365753
footprint QFN-12-EP(2.5x2.5)
pins: 1 SCLK, 2 LRCK, 3 CLKIN, 4 CAP1, 5 CAP2, 6 AOUTLN, 7 AOUTLP, 8 GND, 9 VDD, 10 AOUTRN, 11 AOUTRP, 12 SDATA, 13 EP

## ES8311
designator U?
WQFN-20-EP(3x3) Signal Switches, Multiplexers, Decoders ROHS; Manufacturer: Everest-semi(Everest Semiconductor); Manufacturer Part Number: ES8311; Item Type: IC; Package: WQFN-20-EP(3x3); LCSC Part Number: C962342
footprint WQFN-20-EP(3x3)
pins: 1 CCLK, 2 MCLK, 3 PVDD, 4 DVDD, 5 DGND, 6 SCLK/DMIC_SCL, 7 ASDOUT, 8 LRCK, 9 DSDIN, 10 AGND, 11 AVDD, 12 OUTP, 13 OUTN, 14 DACVREF, 15 ADCVREF, 16 VMID, 17 MIC1N, 18 MIC1P/DMIC_SDA, 19 CDATA, 20 CE, 21 PGND

## ES8388
designator U?
QFN-28-EP(4x4) ADCs/DACs - Special Purpose ROHS; Manufacturer: Everest-semi; Manufacturer Part Number: ES8388; Item Type: IC; Package: QFN-28-EP(4x4); LCSC Part Number: C365736; ComponentLink1Description: LCSC; ComponentLink1URL: https://www.lcsc.com/product-detail/ADCs-DACs-Special-Purpose_Everest-semi-Everest-Semiconductor-ES8388_C365736.html
footprint QFN-28-EP(4x4)
pins: 1 MCLK, 2 DVDD, 3 PVDD, 4 DGND, 5 SCLK, 6 DSDIN, 7 LRCK, 8 ASDOUT, 9 NC, 10 VREF, 11 ROUT1, 12 LOUT1, 13 HPGND, 14 ROUT2, 15 LOUT2, 16 HPVDD, 17 AVDD, 18 AGND, 19 ADCVREF, 20 VMID, 21 RIN2, 22 LIN2, 23 RIN1, 24 LIN1, 25 NC, 26 CE, 27 CDATA, 28 CCLK, 29 EP

## FAN5622SX
designator U?
IC LED DRV LIN SGL WR 30MA 6SSOT; Manufacturer: ON Semiconductor / Fairchild; Manufacturer Part Number: FAN5622SX; Max Supply Voltage: 5.5V; Min Supply Voltage: 2.7V; Number of Outputs: 2; Max Supply Current: 800uA; Power Dissipation: 132mW; Number of Segments: 6; Max Output Voltage: 5V; Supplier: Rs; Supplier Part Number: 7396049P; RoHS: Yes; Category: LED Drivers; Stock: 2995; Pricing: 10=0.48, 100=0.288, 1000=0.218, 3000=0.212 (GBP); Mounting Technology: Surface Mount; Case/Package: SOT-23-6; Pins: 23; Weight: 0.03g; Min Operating Temperature: -40°C; Max Operating Temperature: 85°C; Packaging: Tape and Reel; Package Quantity: 1; Output Current: 30mA; Current Rating: 30mA; Min Input Voltage: 2.7V; Series: -; Radiation Hardening: No; Lead Free: Lead Free; RoHS Compliant: Yes; ComponentLink1URL: https://datasheet.ciiva.com/1946/fan5622-1946946.pdf?src-supplier=Digi-Key; ComponentLink1Description: https://datasheet.ciiva.com/1946/fan5622-1946946.pdf?src-supplier=Digi-Key; ComponentLink2URL: https://datasheet.ciiva.com/1946/fan5622-1946947.pdf?src-supplier=Digi-Key; ComponentLink2Description: https://datasheet.ciiva.com/1946/fan5622-1946947.pdf?src-supplier=Digi-Key; ComponentLink3URL: https://datasheet.ciiva.com/1946/fan5622-1946948.pdf?src-supplier=Digi-Key; ComponentLink3Description: https://datasheet.ciiva.com/1946/fan5622-1946948.pdf?src-supplier=Digi-Key; ComponentLink4URL: https://datasheet.ciiva.com/3164/fan5624-3164252.pdf?src-supplier=Avnet; ComponentLink4Description: https://datasheet.ciiva.com/3164/fan5624-3164252.pdf?src-supplier=Avnet; JLCPCB: C890820; Item Type: IC
footprint SuperSOT-6
pins: 1 CTRL, 2 GND, 3 VIN, 4 LED1, 5 ISET, 6 LED2

## FAN54120MP420X
designator U?
500Ma Usb Compatible Single Cell Li-Ion Linear Charger With Float Voltage Of 4.2V / Reel; Manufacturer: ON Semiconductor; Manufacturer Part Number: FAN54120MP420X; Item Type: IC; Fault Protection: Over Current,Over Voltage,Short Circuit; Number of Cells: 1; Battery Pack Voltage: 4.5V; Max Supply Voltage: 6V; LCSC Part Number: C890816; ComponentLink1Description: LCSC; ComponentLink1URL: https://www.lcsc.com/product-detail/Battery-Management-ICs_onsemi-FAN54120MP420X_C890816.html; Supplier: Arrow Electronics; Supplier Part Number: FAN54120MP420X; RoHS: Yes; Stock: 3000; Pricing: 3000=0.9606, 6000=0.9252, 12000=0.8029, 15000=0.7598, 24000=0.7093, 30000=0.6852 (USD); Mounting Technology: Surface Mount; Case/Package: DFN; Min Operating Temperature: -30°C; Max Operating Temperature: 85°C; Interface: USB; Series: -; Max Charge Current: 500mA; RoHS Compliant: Yes
footprint DFN-6-EP(2x2)
pins: 1 VIN, 2 ISET, 3 NTC, 4 ~{STAT}, 5 GND, 6 BAT, 7 GND

## FSA2466UMX
designator U?
IC SWITCH DPDT X 2 1.6OHM 16UMLP; Manufacturer: ON Semiconductor / Fairchild; Manufacturer Part Number: FSA2466UMX; Number of Circuits: 2NUMBER; Value: 2.5R; -3db Bandwidth: 245MHz; Drain to Source Resistance: 6R; Supplier: Digikey; LCSC Part Number: C457657; RoHS: Yes; Item Type: IC; Stock: 11872; Pricing: 1=1.12, 10=0.667, 25=0.5544, 100=0.4311, 250=0.37216, 500=0.33654, 1000=0.30713, 2500=0.27594 (USD); Lead Free: 5697LeadFree; ComponentLink1URL: https://datasheet.ciiva.com/15013/fsa2466-15013617.pdf?src-supplier=Digikey; ComponentLink1Description: https://datasheet.ciiva.com/15013/fsa2466-15013617.pdf?src-supplier=Digikey; ComponentLink2URL: https://datasheet.ciiva.com/14799/fsa2466-14799338.pdf?src-supplier=Digikey; ComponentLink2Description: https://datasheet.ciiva.com/14799/fsa2466-14799338.pdf?src-supplier=Digikey; ComponentLink3URL: https://datasheet.ciiva.com/11576/fsa2466-11576492.pdf?src-supplier=Avnet; ComponentLink3Description: https://datasheet.ciiva.com/11576/fsa2466-11576492.pdf?src-supplier=Avnet; ComponentLink4URL: https://datasheet.ciiva.com/48709/001252703-da-01-en-ic-anlg-sw-data-a-fsa2466umx-umlp-16-fsc-48709318.pdf?src-supplier=Conrad; ComponentLink4Description: https://datasheet.ciiva.com/48709/001252703-da-01-en-ic-anlg-sw-data-a-fsa2466umx-umlp-16-fsc-48709318.pdf?src-supplier=Conrad
footprint 16-UMLP (1.8x2.6)
pins: 1 NC1, 2 IN 1-2, 3 NO2, 4 COM2, 5 NC2, 6 GND, 7 NO3, 8 COM3, 9 NC3, 10 IN 3-4, 11 NO4, 12 COM4, 13 NC4, 14 VCC, 15 NO1, 16 COM1

## FSUSB42MUX
designator U?
IC USB SWITCH DPDT 10MSOP; Manufacturer: ON Semiconductor / Fairchild; Manufacturer Part Number: FSUSB42MUX; Interface: 224,1532Interface; Nominal Supply Current: 1uA; Number of Circuits: 2NUMBER; Value: 6.5R; Supplier: Avnet; Supplier Part Number: 08AK6019; RoHS: Yes; Item Type: IC; Stock: 4000; Pricing: 1=0.842, 25=0.766, 50=0.646, 100=0.524, 250=0.512 (USD); ComponentLink1URL: https://datasheet.ciiva.com/3232/fsusb42-3232662.pdf?src-supplier=Avnet; ComponentLink1Description: https://datasheet.ciiva.com/3232/fsusb42-3232662.pdf?src-supplier=Avnet; ComponentLink2URL: https://datasheet.ciiva.com/3233/fsusb42-3233258.pdf?src-supplier=Avnet; ComponentLink2Description: https://datasheet.ciiva.com/3233/fsusb42-3233258.pdf?src-supplier=Avnet; ComponentLink3URL: https://datasheet.ciiva.com/4924/fsusb42-112719-4924269.pdf?src-supplier=Mouser; ComponentLink3Description: https://datasheet.ciiva.com/4924/fsusb42-112719-4924269.pdf?src-supplier=Mouser; ComponentLink4URL: https://datasheet.ciiva.com/1666/fsusb42-1666347.pdf?src-supplier=Digikey; ComponentLink4Description: https://datasheet.ciiva.com/1666/fsusb42-1666347.pdf?src-supplier=Digikey; ComponentLink5URL: https://datasheet.ciiva.com/1666/fsusb42-1666348.pdf?src-supplier=Digikey; ComponentLink5Description: https://datasheet.ciiva.com/1666/fsusb42-1666348.pdf?src-supplier=Digikey; ComponentLink6URL: https://datasheet.ciiva.com/1666/fsusb42-1666349.pdf?src-supplier=Digikey; ComponentLink6Description: https://datasheet.ciiva.com/1666/fsusb42-1666349.pdf?src-supplier=Digikey; LCSC Part Number: C11355
footprint 10-MSOP
pins: 1 VCC, 2 SEL, 3 D+, 4 D-, 5 GND, 6 HSD1-, 7 HSD1+, 8 HSD2-, 9 HSD2+, 10 ~{OE}

## FT24C16A-ESR-T
designator U?
IC EEPROM 16KBIT I2C 1MHZ 8SOP; Manufacturer: Fremont Micro Devices; Manufacturer Part Number: FT24C16A-ESR-T; Supplier: Digi-Key; Supplier Part Number: 1219-1246-2-ND; RoHS: No; Category: Memory; Pricing: 2500=0.16918 (USD); LCSC Part Number: C232877; Item Type: IC
footprint SOP-8
pins: 1 NC, 2 NC, 3 NC, 4 GND, 5 SDA, 6 SCL, 7 WP, 8 VCC

## FT24C16A-USR-T
designator U?
IC EEPROM 16KBIT I2C 1MHZ 8SOP; Manufacturer: Fremont Micro Devices; Manufacturer Part Number: FT24C16A-USR-T; Interface: I2C,Serial,2-Wire; Supplier: Digi-Key; Supplier Part Number: 1219-1094-1-ND; RoHS: Yes; Category: Memory; Pricing: 1=0.16, 10=0.162, 25=0.15, 50=0.1492, 100=0.1325, 250=0.1308, 500=0.12882, 1000=0.12538 (USD); Case/Package: SOIC; Pins: 8; Min Operating Temperature: -40°C; Max Operating Temperature: 85°C; Package Quantity: 1; Packaging: Cut Tape; Memory Format: EEPROM; RoHS Compliant: Yes; ComponentLink1URL: https://datasheet.ciiva.com/14084/en-24c04-16-300-v3p8-14084208.pdf?src-supplier=Digi-Key; ComponentLink1Description: https://datasheet.ciiva.com/14084/en-24c04-16-300-v3p8-14084208.pdf?src-supplier=Digi-Key; ComponentLink2URL: https://datasheet.ciiva.com/14084/en-24c04-16-300-v3p8-14084207.pdf?src-supplier=Digi-Key; ComponentLink2Description: https://datasheet.ciiva.com/14084/en-24c04-16-300-v3p8-14084207.pdf?src-supplier=Digi-Key; Item Type: IC
footprint SOP-8
pins: 1 A0, 2 A1, 3 A2, 4 GND, 5 SDA, 6 SCL, 7 WP, 8 VCC

## FUSB302BMPX
designator U?
IC USB TYPE C CTLR PROGR 14-MLP; Manufacturer: ON Semiconductor / Fairchild; Manufacturer Part Number: FUSB302BMPX; Operating Supply Current: 25uA; USB Standard: 6111USBStandard; Data Rate: 5Gbps; Max Supply Voltage: 21V; Min Supply Voltage: 2.7V; Number of Ports: 1NUMBER; Supplier: Avnet; Supplier Part Number: FUSB302BMPX; RoHS: Yes; Category: USB Interface ICs; Stock: 4000; Pricing: 1429=0.518, 1500=0.504, 2900=0.49, 7200=0.476, 15000=0.462, 72000=0.448, 150000=0.434 (USD); Mounting Technology: Surface Mount; Min Operating Temperature: -40°C; Max Operating Temperature: 125°C; Interface: USB; Packaging: Cut Tape; Series: -; Height: 800um; RoHS Compliant: Yes; LCSC Part Number: C132291; Item Type: IC
footprint WFQFN-14(2.5x2.5)
pins: 1 CC2, 2 VBUS, 3 VDD, 4 VDD, 5 INT_N, 6 SCL, 7 SDA, 8 GND, 9 GND, 10 CC1, 11 CC1, 12 VCONN, 13 VCONN, 14 CC2, 15 ePAD

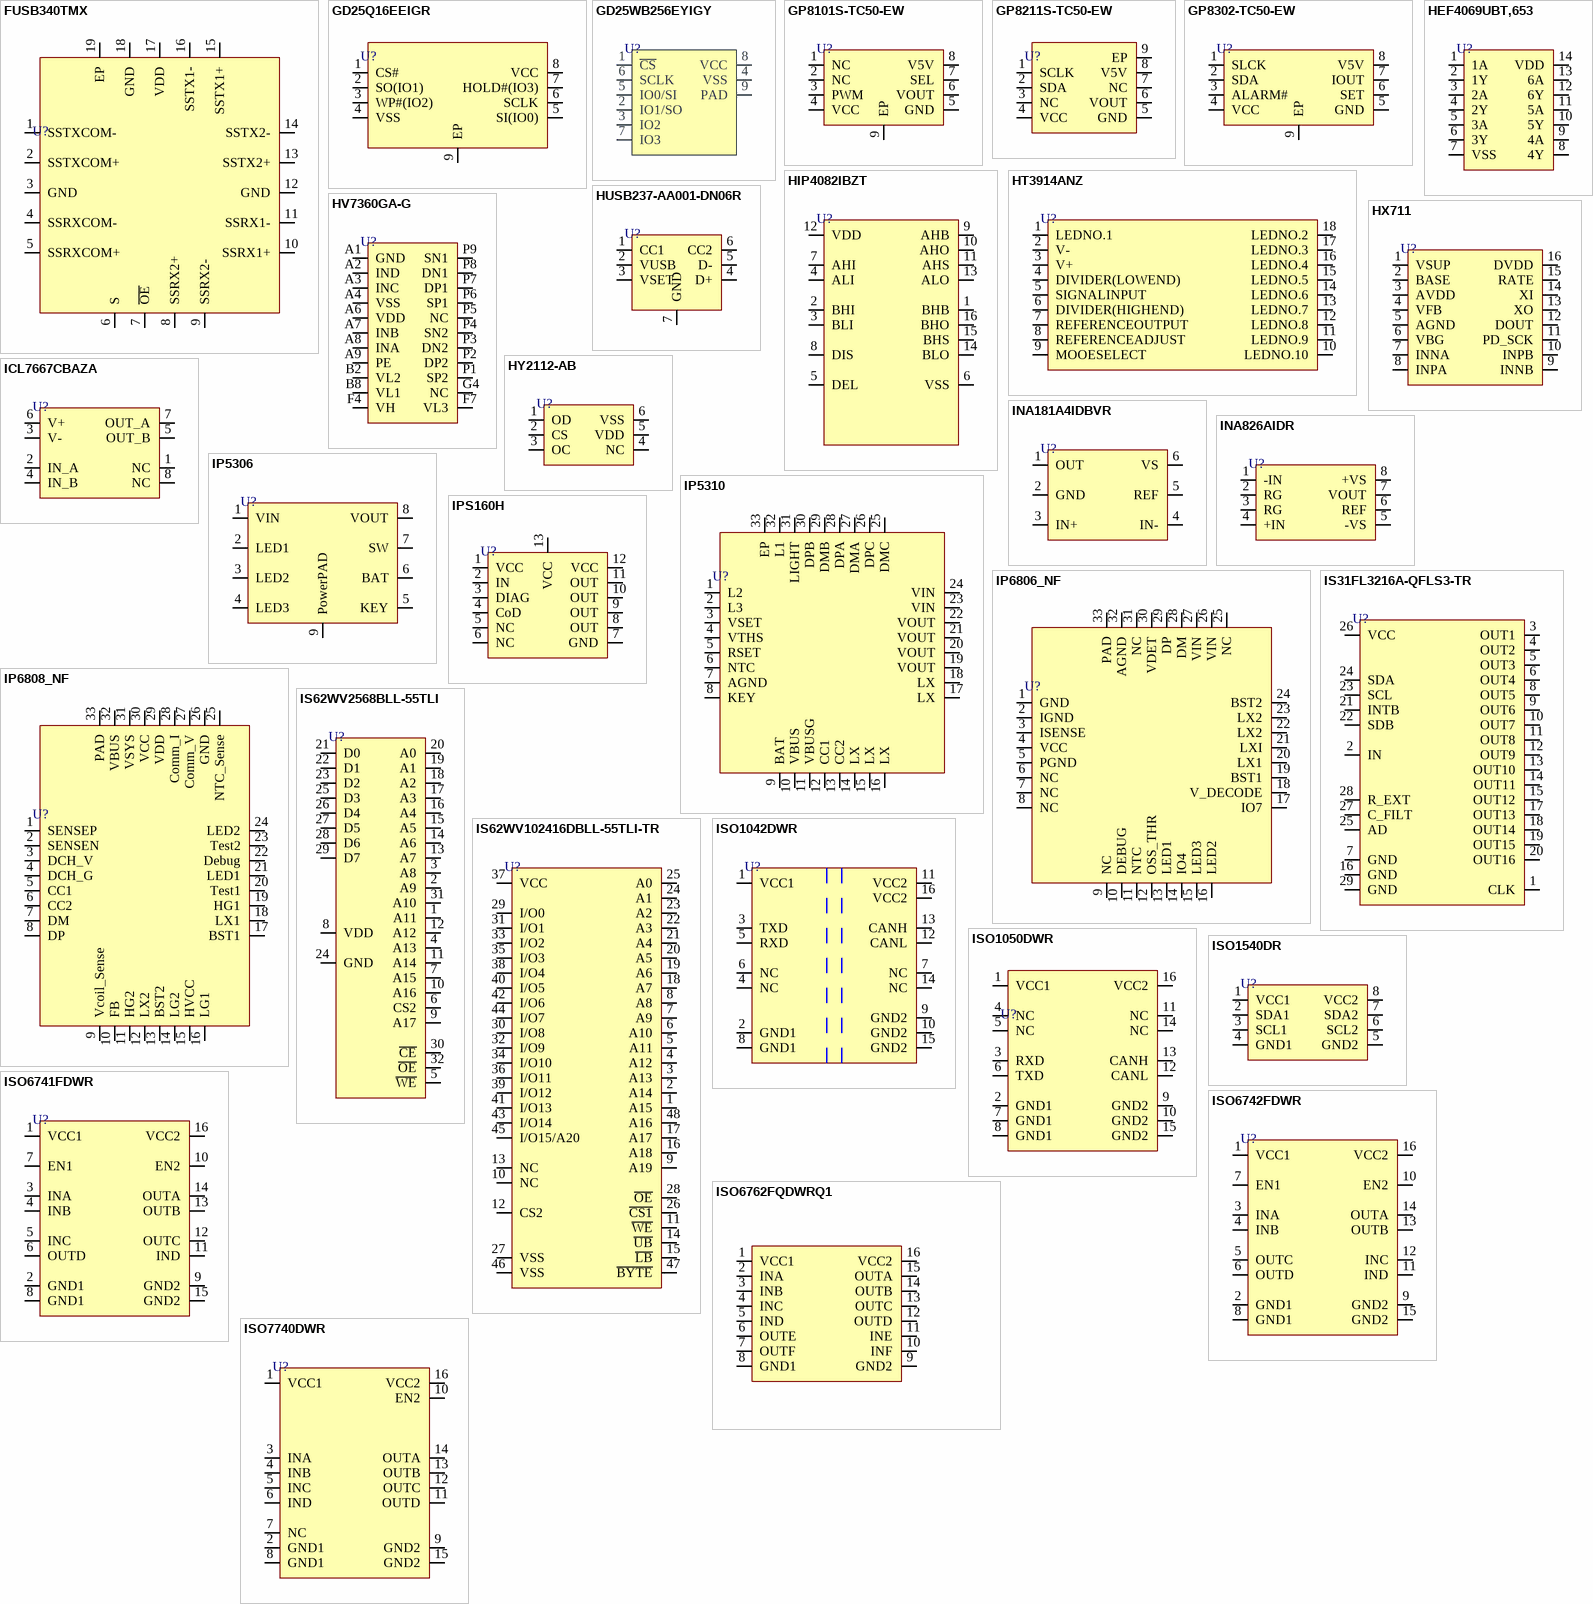
[diagram p5: symbols FUSB340TMX to ISO7740DWR]

## FUSB340TMX
designator U?
IC USB TYPE C CTLR PROGR 18TMLP; Manufacturer: ON Semiconductor / Fairchild; Manufacturer Part Number: FUSB340TMX; Item Type: USB Interface ICs; Operating Supply Current: 12uA; Number of Switches: 4; Data Rate: 10Gbps; Max Supply Voltage: 5V; Min Supply Voltage: 1.5V; Supplier: Avnet; Supplier Part Number: FUSB340TMX; RoHS: Yes; Stock: 15000; Pricing: 1516=0.4884, 1600=0.4752, 3100=0.462, 7600=0.4488, 16000=0.4356, 76000=0.4224, 160000=0.4092 (USD); Mounting Technology: Surface Mount; Pins: 18; Weight: 0.0065g; Min Operating Temperature: -40°C; Max Operating Temperature: 85°C; Packaging: Cut Tape; Interface: USB; Series: -; Nominal Supply Current: 12uA; Height: 400um; RoHS Compliant: Yes; ComponentLink1URL: http://www.farnell.com/datasheets/2313412.pdf?src-supplier=Farnell; ComponentLink1Description: http://www.farnell.com/datasheets/2313412.pdf?src-supplier=Farnell; ComponentLink2URL: http://www.farnell.com/datasheets/2313412.pdf?src-supplier=Newark; ComponentLink2Description: http://www.farnell.com/datasheets/2313412.pdf?src-supplier=Newark; ComponentLink3URL: https://datasheet.octopart.com/FUSB340TMX-ON-Semiconductor-datasheet-85553255.pdf?src-supplier=Farnell; ComponentLink3Description: https://datasheet.octopart.com/FUSB340TMX-ON-Semiconductor-datasheet-85553255.pdf?src-supplier=Farnell; ComponentLink4URL: https://datasheet.octopart.com/FUSB340TMX-ON-Semiconductor-datasheet-46935021.pdf?src-supplier=Future+Electronics; ComponentLink4Description: https://datasheet.octopart.com/FUSB340TMX-ON-Semiconductor-datasheet-46935021.pdf?src-supplier=Future+Electronics; ComponentLink5URL: https://www.fairchildsemi.com/Assets/-Featured-Collateral/Datasheet-Briefs/FUSB340_PB_Final.pdf?src-supplier=Avnet; ComponentLink5Description: https://www.fairchildsemi.com/Assets/-Featured-Collateral/Datasheet-Briefs/FUSB340_PB_Final.pdf?src-supplier=Avnet; LCSC Part Number: C478457
footprint X2-QFN-18
pins: 1 SSTXCOM-, 2 SSTXCOM+, 3 GND, 4 SSRXCOM-, 5 SSRXCOM+, 6 S, 7 ~{OE}, 8 SSRX2+, 9 SSRX2-, 10 SSRX1+, 11 SSRX1-, 12 GND, 13 SSTX2+, 14 SSTX2-, 15 SSTX1+, 16 SSTX1-, 17 VDD, 18 GND, 19 EP

## GD25Q16EEIGR
designator U?
IC FLASH 16MBIT SPI/QUAD 8USON; Manufacturer: GigaDevice; Manufacturer Part Number: GD25Q16EEIGR; Supplier: Digikey; LCSC Part Number: C2986331; RoHS: No; Item Type: IC; Stock: 2468; Pricing: 1=0.84, 10=0.75, 25=0.7152, 50=0.69, 100=0.6658, 250=0.63504, 500=0.61266, 1000=0.59108 (USD)
footprint USON-8(2x3)
pins: 1 CS#, 2 SO(IO1), 3 WP#(IO2), 4 VSS, 5 SI(IO0), 6 SCLK, 7 HOLD#(IO3), 8 VCC, 9 EP

## GD25WB256EYIGY
designator U?
IC FLASH 256MBIT SPI/QUAD 8WSON; Manufacturer: GigaDevice; Manufacturer Part Number: GD25WB256EYIGY; Supplier: Digikey; Supplier Part Number: 1970-GD25WB256EYIGY-ND; RoHS: No; Item Type: IC
footprint 8-WSON (8x6)
pins: 1 ~{CS}, 2 IO1/SO, 3 IO2, 4 VSS, 5 IO0/SI, 6 SCLK, 7 IO3, 8 VCC, 9 PAD

## GP8101S-TC50-EW
designator U?
ESOP-8 ADC/DAC - Specialized ROHS; Manufacturer: Guestgood; Manufacturer Part Number: GP8101S-TC50-EW; Item Type: IC; Package: ESOP-8; LCSC Part Number: C2837711; ComponentLink1Description: LCSC; ComponentLink1URL: https://www.lcsc.com/product-detail/ADC-DAC-Specialized_Guestgood-GP8101S-TC50-EW_C2837711.html
footprint ESOP-8
pins: 1 NC, 2 NC, 3 PWM, 4 VCC, 5 GND, 6 VOUT, 7 SEL, 8 V5V, 9 EP

## GP8211S-TC50-EW
designator U?
ESOP-8 Digital to Analog Converters (DAC) ROHS; Manufacturer: Guestgood; Manufacturer Part Number: GP8211S-TC50-EW; Item Type: IC; Package: ESOP-8; LCSC Part Number: C3152008; ComponentLink1Description: LCSC; ComponentLink1URL: https://www.lcsc.com/product-detail/Digital-to-Analog-Converters-DAC_Guestgood-GP8211S-TC50-EW_C3152008.html?s_z=n_gp8211S
footprint ESOP-8
pins: 1 SCLK, 2 SDA, 3 NC, 4 VCC, 5 GND, 6 VOUT, 7 NC, 8 V5V, 9 EP

## GP8302-TC50-EW
designator U?
ESOP-8 Digital to Analog Converters (DAC) ROHS; Manufacturer: Guestgood; Manufacturer Part Number: GP8302-TC50-EW; Item Type: IC; Package: ESOP-8; LCSC Part Number: C2856295; ComponentLink1Description: LCSC; ComponentLink1URL: https://www.lcsc.com/product-detail/Digital-to-Analog-Converters-DAC_Guestgood-GP8302-TC50-EW_C2856295.html?s_z=n_GP8302-TC50-EW
footprint ESOP-8
pins: 1 SLCK, 2 SDA, 3 ALARM#, 4 VCC, 5 GND, 6 SET, 7 IOUT, 8 V5V, 9 EP

## HEF4069UBT,653
designator U?
IC INVERTER 6CH 1-INP 14SO; Manufacturer: Nexperia; Manufacturer Part Number: HEF4069UBT,653; Supplier: Future Electronics; Supplier Part Number: 4111431; RoHS: Yes; Item Type: IC; Stock: 2500; Pricing: 2500=0.109, 7500=0.106, 10000=0.105, 25000=0.103, 37500=0.1 (USD); RoHS Compliant: Yes; ComponentLink1URL: https://datasheet.octopart.com/HEF4069UBT%2C653-Nexperia-datasheet-11793750.pdf?src-supplier=Farnell; ComponentLink1Description: https://datasheet.octopart.com/HEF4069UBT%2C653-Nexperia-datasheet-11793750.pdf?src-supplier=Farnell; ComponentLink2URL: https://datasheet.octopart.com/HEF4069UBT%2C653-Nexperia-datasheet-62331911.pdf?src-supplier=Element14; ComponentLink2Description: https://datasheet.octopart.com/HEF4069UBT%2C653-Nexperia-datasheet-62331911.pdf?src-supplier=Element14; ComponentLink3URL: https://assets.nexperia.com/documents/data-sheet/HEF4069UB.pdf?src-supplier=Digikey; ComponentLink3Description: https://assets.nexperia.com/documents/data-sheet/HEF4069UB.pdf?src-supplier=Digikey; ComponentLink4URL: https://datasheet.octopart.com/HEF4069UBT%2C653-NXP-Semiconductors-datasheet-8884867.pdf?src-supplier=Newark; ComponentLink4Description: https://datasheet.octopart.com/HEF4069UBT%2C653-NXP-Semiconductors-datasheet-8884867.pdf?src-supplier=Newark; ComponentLink5URL: https://datasheet.octopart.com/HEF4069UBT%2C653-Nexperia-datasheet-10127420.pdf?src-supplier=Future+Electronics; ComponentLink5Description: https://datasheet.octopart.com/HEF4069UBT%2C653-Nexperia-datasheet-10127420.pdf?src-supplier=Future+Electronics; LCSC Part Number: C6739
footprint SOIC-14
pins: 1 1A, 2 1Y, 3 2A, 4 2Y, 5 3A, 6 3Y, 7 VSS, 8 4Y, 9 4A, 10 5Y, 11 5A, 12 6Y, 13 6A, 14 VDD

## HIP4082IBZT
designator U?
IC HALF/FULL BRIDGE DRVR 16SOIC; Manufacturer: Renesas; Manufacturer Part Number: HIP4082IBZT; Package Body Material: Plastic; Max Supply Current: 6.6mA; Max Supply Voltage: 15V; Min Supply Voltage: 8.5V; Output Polarity: True; High Side Driver: Yes; Input Characteristics: SCHMITT TRIGGER; Interface IC Type: FULL BRIDGE BASED MOSFET DRIVER; Channels: 1; Nominal Supply Voltage: 12V; Time @ Peak Reflow Temperature-Max (s): 30s; Turn-Off Delay Time: 0.1us; Turn-On Delay Time: 0.15us; Supplier: Mouser; LCSC Part Number: C50123; RoHS: Yes; Item Type: IC; Pricing: 1=5.15, 10=3.58, 50=3.58, 100=3, 1000=2.41, 10000=2.17 (USD); Pins: 16; Case/Package: SOP; Package Shape: Rectangular; Terminal Finish: Tin; Min Operating Temperature: -55°C; Max Operating Temperature: 125°C; JESD-609 Code: e3; JESD-30 Code: R-PDSO-G16; Moisture Sensitivity Level: 3; Package Style: SMALL OUTLINEMeter; Peak Reflow Temperature (Cel): 260°C; Surface Mount: Yes; Terminal Form: Gull Wing; Terminal Position: DUAL; Length: 9.9mm; Width: 3.9mm; Height - Seated (Max): 1.75mm; Terminal Pitch: 1.27mm; RoHS Compliant: Yes; Reach SVHC Compliant: Yes; Temperature Grade: MILITARY; ComponentLink1URL: https://datasheet.ciiva.com/pdfs/VipMasterIC/IC/RNCC/RNCC-S-A0009641229/RNCC-S-A0009884734-1.pdf?src-supplier=IHS+Markit; ComponentLink1Description: https://datasheet.ciiva.com/pdfs/VipMasterIC/IC/RNCC/RNCC-S-A0009641229/RNCC-S-A0009884734-1.pdf?src-supplier=IHS+Markit; ComponentLink2URL: https://www.renesas.com/en-us/www/doc/datasheet/hip4082.pdf?src-supplier=Digikey; ComponentLink2Description: https://www.renesas.com/en-us/www/doc/datasheet/hip4082.pdf?src-supplier=Digikey; ComponentLink3URL: https://datasheet.octopart.com/HIP4082IBZT-Renesas-datasheet-8985.pdf?src-supplier=Element14; ComponentLink3Description: https://datasheet.octopart.com/HIP4082IBZT-Renesas-datasheet-8985.pdf?src-supplier=Element14; ComponentLink4URL: https://datasheet.octopart.com/HIP4082IBZT-Renesas-datasheet-8985.pdf?src-supplier=Newark; ComponentLink4Description: https://datasheet.octopart.com/HIP4082IBZT-Renesas-datasheet-8985.pdf?src-supplier=Newark
footprint 16-SOIC (0.154", 3.90mm Width)
pins: 1 BHB, 2 BHI, 3 BLI, 4 ALI, 5 DEL, 6 VSS, 7 AHI, 8 DIS, 9 AHB, 10 AHO, 11 AHS, 12 VDD, 13 ALO, 14 BLO, 15 BHS, 16 BHO

## HT3914ANZ
designator U?
DIP-18 Other Lighting Drivers ROHS; Manufacturer: Tae Jin Technology; Manufacturer Part Number: HT3914ANZ; Item Type: IC; Supplier: LCSC; LCSC Part Number: C2874959; RoHS: No
footprint DIP-18
pins: 1 LEDNO.1, 2 V-, 3 V+, 4 DIVIDER(LOWEND), 5 SIGNALINPUT, 6 DIVIDER(HIGHEND), 7 REFERENCEOUTPUT, 8 REFERENCEADJUST, 9 MOOESELECT, 10 LEDNO.10, 11 LEDNO.9, 12 LEDNO.8, 13 LEDNO.7, 14 LEDNO.6, 15 LEDNO.5, 16 LEDNO.4, 17 LEDNO.3, 18 LEDNO.2